# Altium schematic symbol library SS24M.SchLib: 1 symbol
Pins are listed as number, name and electrical type; pins without a type are passive.

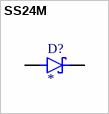
[diagram p0: symbol SS24M]

## SS24M
designator D?
MP: SS24M; Value: *; Package: None; Price: None; Availability: Unavailable
footprint SODFL2512X73N
pins: A, C K